# Altium schematic symbol library Si1308EDL-T1-GE3.SchLib: 1 symbol
Pins are listed as number, name and electrical type; pins without a type are passive.

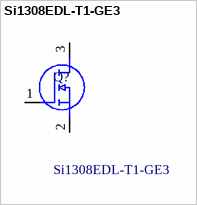
[diagram p0: symbol Si1308EDL-T1-GE3]

## Si1308EDL-T1-GE3
designator Q?
MOSFET N-Ch 30V 1.5A TrenchFET SC70 Vishay Si1308EDL-T1-GE3 N-channel MOSFET Transistor, 1.5 A, 30 V, 3-Pin SC-70; Geometry.Height: 1.1mm; Manufacturer_Name: Vishay; Manufacturer_Part_Number: Si1308EDL-T1-GE3; Mouser Part Number: 78-SI1308EDL-T1-GE3; Mouser Price/Stock: https://www.mouser.co.uk/ProductDetail/Vishay-Semiconductors/SI1308EDL-T1-GE3?qs=bX1%252BNvsK%2FBramh9tgpOaEw%3D%3D; Arrow Part Number: SI1308EDL-T1-GE3; Arrow Price/Stock: https://www.arrow.com/en/products/si1308edl-t1-ge3/vishay.html?utm_currency=USD&region=nac; Datasheet Link: https://componentsearchengine.com/Datasheets/1/SI1308EDL-T1-GE3.pdf
footprint SOT-323
pins: 1 G, 2 S, 3 D